# Altium schematic symbol library variants.SchLib: 1 symbol
Pins are listed as number, name and electrical type; pins without a type are passive.

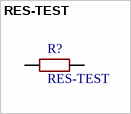
[diagram p0: symbol RES-TEST]

## RES-TEST
designator R?
Resistor, test symbol
footprint R0603-TEST (Footprint R0603-TEST)
pins: 1, 2